# Altium footprint library Master.PcbLib: 178 footprints (part 10 of 12)
Each footprint in its own frame and in the unit in brackets; x right, y up, seen from the top. Pads: shape width x height; smd on the part's side, far side on the other; paste and mask are expansions set on the pad; w line width, h text height; cw(c..) or ccw(c..) is an arc to the next point about the centre after c.
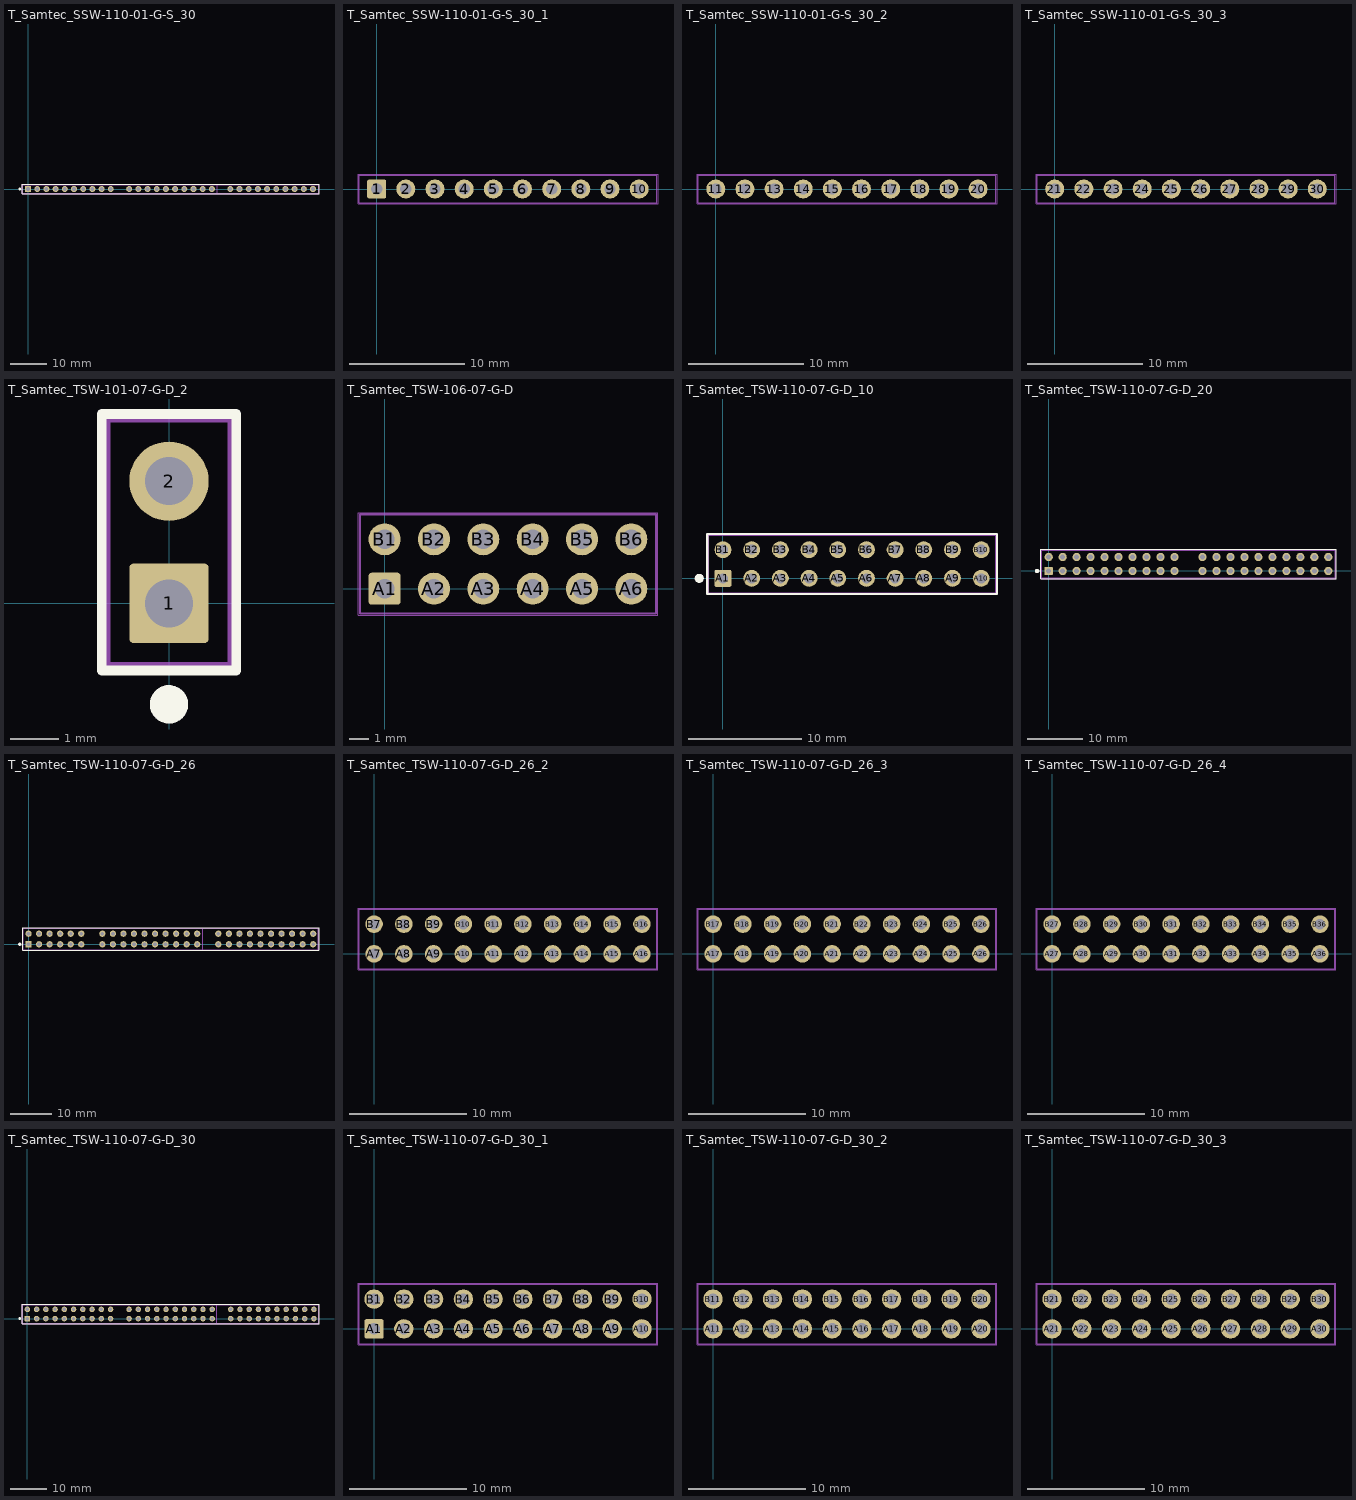
[diagram p9: the footprints below, top view; thin cyan lines are the x and y axes]

## T_Samtec_SSW-110-01-G-S_30 [mm]
pads (30):
  rrect20% 1.65x1.65 hole 1: 1(0,0)
  round 1.65 hole 1: 2(2.54,0) 3(5.08,0) 4(7.62,0) 5(10.16,0) 6(12.7,0) 7(15.24,0) 8(17.78,0) 9(20.32,0) 10(22.86,0) 11(27.94,0) 12(30.48,0) 13(33.02,0) 14(35.56,0) 15(38.1,0) 16(40.64,0) 17(43.18,0) 18(45.72,0) 19(48.26,0) 20(50.8,0) 21(55.88,0) 22(58.42,0) 23(60.96,0) 24(63.5,0) 25(66.04,0) 26(68.58,0) 27(71.12,0) 28(73.66,0) 29(76.2,0) 30(78.74,0)
Top Overlay:
  circle w0.4: c-2.3,0 r0.2
  lines w0.2: -1.65,-1.33 80.391,-1.33 80.391,1.33 -1.65,1.33 -1.65,-1.33
Top Component Outline:
  lines w0.05: -1.625,-1.305 -1.625,1.305 80.366,1.305 80.366,-1.305 -1.625,-1.305
Top 3D Body:
  lines w0.001: 80.265,-1.205 80.265,1.205 ; -1.525,-1.205 -1.525,1.205 52.325,1.205 52.325,-1.205 -1.525,-1.205
Top Component Center:
  circle w0.05: c0,0 r0.35
  lines w0.05: -0.5,0 0.5,0 ; 0,-0.5 0,0.5
Top Dimensions:
  lines w0.1: -1.525,-1.2 80.264,-1.2 80.264,1.2 -1.525,1.2 -1.525,-1.2
Top Assembly:
  text ".Designator" at 38.938,1.778 h0.75
3D body "Samtec-SSW-110-01-G-P.step": height 8.52, standoff -2.63, extent -1.524,-1.206 24.384,1.207
3D body "Samtec-SSW-110-01-G-P.step": height 8.52, standoff -2.63, extent 26.416,-1.206 52.324,1.207
3D body "Samtec-SSW-110-01-G-P.step": height 8.52, standoff -2.63, extent 54.356,-1.206 80.264,1.207

## T_Samtec_SSW-110-01-G-S_30_1 [mm]
pads (10):
  rrect20% 1.65x1.65 hole 1: 1(0,0)
  round 1.65 hole 1: 2(2.54,0) 3(5.08,0) 4(7.62,0) 5(10.16,0) 6(12.7,0) 7(15.24,0) 8(17.78,0) 9(20.32,0) 10(22.86,0)
Top Component Outline:
  lines w0.05: -1.625,-1.305 24.5,-1.305 24.5,1.305 -1.625,1.305 -1.625,-1.305
Top 3D Body:
  lines w0.001: -1.525,-1.205 24.384,-1.205 24.384,1.205 -1.525,1.205 -1.525,-1.205
Top Component Center:
  circle w0.05: c0,0 r0.35
  lines w0.05: -0.5,0 0.5,0 ; 0,-0.5 0,0.5
Top Dimensions:
  lines w0.1: -1.525,-1.2 -1.525,1.2 24.384,1.2 24.384,-1.2 -1.525,-1.2
Top Assembly:
  text ".Designator" at 9.7,1.7 h0.75
3D body "Samtec-SSW-110-01-G-P.step": height 8.52, standoff -2.63, extent -1.524,-1.206 24.384,1.207

## T_Samtec_SSW-110-01-G-S_30_2 [mm]
pads (10):
  round 1.65 hole 1: 11(0,0) 12(2.54,0) 13(5.08,0) 14(7.62,0) 15(10.16,0) 16(12.7,0) 17(15.24,0) 18(17.78,0) 19(20.32,0) 20(22.86,0)
Top Component Outline:
  lines w0.05: -1.64,-1.305 -1.64,1.305 24.51,1.305 24.51,-1.305 -1.64,-1.305
Top 3D Body:
  lines w0.001: -1.524,-1.205 -1.524,1.205 24.385,1.205 24.385,-1.205 -1.524,-1.205
Top Component Center:
  circle w0.05: c0,0 r0.35
  lines w0.05: -0.5,0 0.5,0 ; 0,-0.5 0,0.5
Top Dimensions:
  lines w0.1: -1.524,-1.2 24.384,-1.2 24.384,1.2 -1.524,1.2 -1.524,-1.2
Top Assembly:
  text ".Designator" at 9.728,1.778 h0.75
3D body "Samtec-SSW-110-01-G-P.step": height 8.52, standoff -2.63, extent -1.524,-1.206 24.384,1.207

## T_Samtec_SSW-110-01-G-S_30_3 [mm]
pads (10):
  round 1.65 hole 1: 21(0,0) 22(2.54,0) 23(5.08,0) 24(7.62,0) 25(10.16,0) 26(12.7,0) 27(15.24,0) 28(17.78,0) 29(20.32,0) 30(22.86,0)
Top Component Outline:
  lines w0.05: -1.626,-1.305 -1.626,1.305 24.486,1.305 24.486,-1.305 -1.626,-1.305
Top 3D Body:
  lines w0.001: 24.385,-1.205 24.385,1.205 ; 24.385,-1.205 -1.524,-1.205 -1.524,1.205 24.385,1.205 ; 24.385,-1.205 24.385,1.205
Top Component Center:
  circle w0.05: c0,0 r0.35
  lines w0.05: -0.5,0 0.5,0 ; 0,-0.5 0,0.5
Top Dimensions:
  lines w0.1: -1.524,-1.2 24.384,-1.2 24.384,1.2 -1.524,1.2 -1.524,-1.2
Top Assembly:
  text ".Designator" at 9.62,1.5 h0.75
3D body "Samtec-SSW-110-01-G-P.step": height 8.52, standoff -2.63, extent -1.524,-1.206 24.384,1.207

## T_Samtec_TSW-101-07-G-D_2 [mm]
pads (2):
  rrect10% 1.65x1.65 hole 1: 1(0,0)
  round 1.65 hole 1: 2(0,2.54)
Top Overlay:
  circle w0.4: c0,-2.1 r0.2
  lines w0.2: -1.395,-1.395 -1.395,3.935 1.395,3.935 1.395,-1.395 -1.395,-1.395
Top Component Outline:
  lines w0.05: -1.37,-1.37 1.37,-1.37 1.37,3.91 -1.37,3.91 -1.37,-1.37
Top 3D Body:
  lines w0.001: -1.27,-1.27 -1.27,3.81 1.27,3.81 1.27,-1.27 -1.27,-1.27
Top Component Center:
  circle w0.05: c0,0 r0.35
  lines w0.05: -0.5,0 0.5,0 ; 0,-0.5 0,0.5
Top Dimensions:
  lines w0.1: -1.27,-1.27 1.27,-1.27 1.27,3.81 -1.27,3.81 -1.27,-1.27
Top Assembly:
  text ".Designator" at 2.1,-0.3 h0.75
3D body "Samtec-TSW-101-07-G-D.step": height 8.4, standoff -2.52, extent -1.27,-1.27 1.27,3.81

## T_Samtec_TSW-106-07-G-D [mm]
pads (12):
  rrect20% 1.65x1.65 hole 1: A1(0,0)
  round 1.65 hole 1: A2(2.54,0) A3(5.08,0) A4(7.62,0) A5(10.16,0) A6(12.7,0) B1(0,2.54) B2(2.54,2.54) B3(5.08,2.54) B4(7.62,2.54) B5(10.16,2.54) B6(12.7,2.54)
Top Component Outline:
  lines w0.05: -1.37,-1.37 -1.37,3.91 14.072,3.91 14.072,-1.37 -1.37,-1.37
Top 3D Body:
  lines w0.001: -1.27,-1.27 -1.27,3.81 13.97,3.81 13.97,-1.27 -1.27,-1.27
Top Component Center:
  circle w0.05: c0,0 r0.35
  lines w0.05: -0.5,0 0.5,0 ; 0,-0.5 0,0.5
Top Dimensions:
  lines w0.1: -1.27,-1.27 13.97,-1.27 13.97,3.81 -1.27,3.81 -1.27,-1.27
Top Assembly:
  text ".Designator" at 4.445,4.445 h0.75
3D body "TSW-106-07-G-D.stp": height 8.39, standoff -2.53, extent -1.27,-1.27 13.97,3.81

## T_Samtec_TSW-110-07-G-D_10 [mm]
pads (20):
  rrect20% 1.5x1.5 hole 0.9: A1(0,0)
  round 1.5 hole 0.9: A2(2.54,0) A3(5.08,0) A4(7.62,0) A5(10.16,0) A6(12.7,0) A7(15.24,0) A8(17.78,0) A9(20.32,0) A10(22.86,0) B1(0,2.54) B2(2.54,2.54) B3(5.08,2.54) B4(7.62,2.54) B5(10.16,2.54) B6(12.7,2.54) B7(15.24,2.54) B8(17.78,2.54) B9(20.32,2.54) B10(22.86,2.54)
Top Overlay:
  circle w0.4: c-2.1,0 r0.2
  lines w0.2: -1.395,-1.395 -1.395,3.935 24.257,3.935 24.257,-1.395 -1.395,-1.395
Top Component Outline:
  lines w0.05: -1.37,-1.37 -1.37,3.91 24.257,3.91 24.257,-1.37 -1.37,-1.37
Top 3D Body:
  lines w0.001: -1.27,-1.27 -1.27,3.81 24.13,3.81 24.13,-1.27 -1.27,-1.27
Top Component Center:
  circle w0.05: c0,0 r0.35
  lines w0.05: -0.5,0 0.5,0 ; 0,-0.5 0,0.5
Top Dimensions:
  lines w0.1: -1.27,-1.27 24.13,-1.27 24.13,3.81 -1.27,3.81 -1.27,-1.27
Top Assembly:
  text ".Designator" at 9.225,4.225 h0.75
3D body "Samtec-TSW-110-07-G-D.step": height 8.4, standoff -2.52, extent -1.27,-1.27 24.13,3.81

## T_Samtec_TSW-110-07-G-D_20 [mm]
pads (40):
  rrect20% 1.5x1.5 hole 0.9: A1(0,0)
  round 1.5 hole 0.9: A2(2.54,0) A3(5.08,0) A4(7.62,0) A5(10.16,0) A6(12.7,0) A7(15.24,0) A8(17.78,0) A9(20.32,0) A10(22.86,0) A11(27.94,0) A12(30.48,0) A13(33.02,0) A14(35.56,0) A15(38.1,0) A16(40.64,0) A17(43.18,0) A18(45.72,0) A19(48.26,0) A20(50.8,0) B1(0,2.54) B2(2.54,2.54) B3(5.08,2.54) B4(7.62,2.54) B5(10.16,2.54) B6(12.7,2.54) B7(15.24,2.54) B8(17.78,2.54) B9(20.32,2.54) B10(22.86,2.54) B11(27.94,2.54) B12(30.48,2.54) B13(33.02,2.54) B14(35.56,2.54) B15(38.1,2.54) B16(40.64,2.54) B17(43.18,2.54) B18(45.72,2.54) B19(48.26,2.54) B20(50.8,2.54)
Top Overlay:
  circle w0.4: c-2.1,0 r0.2
  lines w0.2: -1.395,-1.395 -1.395,3.935 52.195,3.935 52.195,-1.395 -1.395,-1.395
Top Component Outline:
  lines w0.05: -1.37,-1.37 -1.37,3.91 52.17,3.91 52.17,-1.37 -1.37,-1.37
Top 3D Body:
  lines w0.001: 52.07,-1.27 -1.27,-1.27 -1.27,3.81 52.07,3.81 ; 52.07,-1.27 52.07,3.81 ; 52.07,-1.27 52.07,3.81
Top Component Center:
  circle w0.05: c0,0 r0.35
  lines w0.05: -0.5,0 0.5,0 ; 0,-0.5 0,0.5
Top Dimensions:
  lines w0.1: -1.27,-1.27 52.07,-1.27 52.07,3.81 -1.27,3.81 -1.27,-1.27
Top Assembly:
  text ".Designator" at 23.625,4.425 h0.75
3D body "Samtec-TSW-110-07-G-D.step": height 8.4, standoff -2.52, extent 26.67,-1.27 52.07,3.81
3D body "Samtec-TSW-110-07-G-D.step": height 8.4, standoff -2.52, extent -1.27,-1.27 24.13,3.81

## T_Samtec_TSW-110-07-G-D_26 [mm]
pads (52):
  rrect20% 1.5x1.5 hole 0.9: A1(0,0)
  round 1.5 hole 0.9: A2(2.54,0) A3(5.08,0) A4(7.62,0) A5(10.16,0) A6(12.7,0) A7(17.78,0) A8(20.32,0) A9(22.86,0) A10(25.4,0) A11(27.94,0) A12(30.48,0) A13(33.02,0) A14(35.56,0) A15(38.1,0) A16(40.64,0) A17(45.72,0) A18(48.26,0) A19(50.8,0) A20(53.34,0) A21(55.88,0) A22(58.42,0) A23(60.96,0) A24(63.5,0) A25(66.04,0) A26(68.58,0) B1(0,2.54) B2(2.54,2.54) B3(5.08,2.54) B4(7.62,2.54) B5(10.16,2.54) B6(12.7,2.54) B7(17.78,2.54) B8(20.32,2.54) B9(22.86,2.54) B10(25.4,2.54) B11(27.94,2.54) B12(30.48,2.54) B13(33.02,2.54) B14(35.56,2.54) B15(38.1,2.54) B16(40.64,2.54) B17(45.72,2.54) B18(48.26,2.54) B19(50.8,2.54) B20(53.34,2.54) B21(55.88,2.54) B22(58.42,2.54) B23(60.96,2.54) B24(63.5,2.54) B25(66.04,2.54) B26(68.58,2.54)
Top Overlay:
  circle w0.4: c-2.1,0 r0.2
  lines w0.2: 69.952,-1.395 -1.395,-1.395 -1.395,3.935 69.977,3.935 69.977,-1.395
Top Component Outline:
  lines w0.05: -1.37,-1.37 69.952,-1.37 69.952,3.91 -1.37,3.91 -1.37,-1.37
Top 3D Body:
  lines w0.001: 52.07,-1.27 -1.27,-1.27 -1.27,3.81 52.07,3.81 ; 41.91,-1.27 41.91,3.81 41.91,-1.27
Top Component Center:
  circle w0.05: c0,0 r0.35
  lines w0.05: -0.5,0 0.5,0 ; 0,-0.5 0,0.5
Top Dimensions:
  lines w0.1: -1.27,-1.27 -1.27,3.81 69.85,3.81 69.85,-1.27 -1.27,-1.27
Top Assembly:
  text ".Designator" at 33.02,4.445 h0.75
3D body "TSW-106-07-G-D.stp": height 8.39, standoff -2.53, extent -1.27,-1.27 13.97,3.81
3D body "Samtec-TSW-110-07-G-D.step": height 8.4, standoff -2.52, extent 44.45,-1.27 69.85,3.81
3D body "Samtec-TSW-110-07-G-D.step": height 8.4, standoff -2.52, extent 16.51,-1.27 41.91,3.81

## T_Samtec_TSW-110-07-G-D_26_2 [mm]
pads (20):
  round 1.5 hole 0.9: A7(0,0) A8(2.54,0) A9(5.08,0) A10(7.62,0) A11(10.16,0) A12(12.7,0) A13(15.24,0) A14(17.78,0) A15(20.32,0) A16(22.86,0) B7(0,2.54) B8(2.54,2.54) B9(5.08,2.54) B10(7.62,2.54) B11(10.16,2.54) B12(12.7,2.54) B13(15.24,2.54) B14(17.78,2.54) B15(20.32,2.54) B16(22.86,2.54)
Top Component Outline:
  lines w0.05: -1.372,-1.37 24.232,-1.37 24.232,3.91 -1.372,3.91 -1.372,-1.37
Top 3D Body:
  lines w0.001: 24.13,-1.27 24.13,3.81 ; 24.13,-1.27 24.13,3.81 ; 24.13,-1.27 -1.27,-1.27 -1.27,3.81 24.13,3.81
Top Component Center:
  circle w0.05: c0,0 r0.35
  lines w0.05: -0.5,0 0.5,0 ; 0,-0.5 0,0.5
Top Dimensions:
  lines w0.1: -1.27,-1.27 -1.27,3.81 24.13,3.81 24.13,-1.27 -1.27,-1.27
Top Assembly:
  text ".Designator" at 10.795,4.445 h0.75
3D body "Samtec-TSW-110-07-G-D.step": height 8.4, standoff -2.52, extent -1.27,-1.27 24.13,3.81

## T_Samtec_TSW-110-07-G-D_26_3 [mm]
pads (20):
  round 1.5 hole 0.9: A17(0,0) A18(2.54,0) A19(5.08,0) A20(7.62,0) A21(10.16,0) A22(12.7,0) A23(15.24,0) A24(17.78,0) A25(20.32,0) A26(22.86,0) B17(0,2.54) B18(2.54,2.54) B19(5.08,2.54) B20(7.62,2.54) B21(10.16,2.54) B22(12.7,2.54) B23(15.24,2.54) B24(17.78,2.54) B25(20.32,2.54) B26(22.86,2.54)
Top Component Outline:
  lines w0.05: -1.37,-1.37 24.232,-1.37 24.232,3.91 -1.37,3.91 -1.37,-1.37
Top 3D Body:
  lines w0.001: -1.27,-1.27 24.13,-1.27 24.13,3.81 -1.27,3.81 -1.27,-1.27
Top Component Center:
  circle w0.05: c0,0 r0.35
  lines w0.05: -0.5,0 0.5,0 ; 0,-0.5 0,0.5
Top Dimensions:
  lines w0.1: -1.27,-1.27 -1.27,3.81 24.13,3.81 24.13,-1.27 -1.27,-1.27
Top Assembly:
  text ".Designator" at 10.16,4.445 h0.75
3D body "Samtec-TSW-110-07-G-D.step": height 8.4, standoff -2.52, extent -1.27,-1.27 24.13,3.81

## T_Samtec_TSW-110-07-G-D_26_4 [mm]
pads (20):
  round 1.5 hole 0.9: A27(0,0) A28(2.54,0) A29(5.08,0) A30(7.62,0) A31(10.16,0) A32(12.7,0) A33(15.24,0) A34(17.78,0) A35(20.32,0) A36(22.86,0) B27(0,2.54) B28(2.54,2.54) B29(5.08,2.54) B30(7.62,2.54) B31(10.16,2.54) B32(12.7,2.54) B33(15.24,2.54) B34(17.78,2.54) B35(20.32,2.54) B36(22.86,2.54)
Top Component Outline:
  lines w0.05: -1.37,-1.37 -1.37,3.91 24.232,3.91 24.232,-1.37 -1.37,-1.37
Top 3D Body:
  lines w0.001: -1.27,-1.27 -1.27,3.81 24.13,3.81 24.13,-1.27 -1.27,-1.27
Top Component Center:
  circle w0.05: c0,0 r0.35
  lines w0.05: -0.5,0 0.5,0 ; 0,-0.5 0,0.5
Top Dimensions:
  lines w0.1: -1.27,-1.27 24.13,-1.27 24.13,3.81 -1.27,3.81 -1.27,-1.27
Top Assembly:
  text ".Designator" at 10.16,4.445 h0.75
3D body "Samtec-TSW-110-07-G-D.step": height 8.4, standoff -2.52, extent -1.27,-1.27 24.13,3.81

## T_Samtec_TSW-110-07-G-D_30 [mm]
pads (60):
  rrect20% 1.5x1.5 hole 0.9: A1(0,0)
  round 1.5 hole 0.9: A2(2.54,0) A3(5.08,0) A4(7.62,0) A5(10.16,0) A6(12.7,0) A7(15.24,0) A8(17.78,0) A9(20.32,0) A10(22.86,0) A11(27.94,0) A12(30.48,0) A13(33.02,0) A14(35.56,0) A15(38.1,0) A16(40.64,0) A17(43.18,0) A18(45.72,0) A19(48.26,0) A20(50.8,0) A21(55.88,0) A22(58.42,0) A23(60.96,0) A24(63.5,0) A25(66.04,0) A26(68.58,0) A27(71.12,0) A28(73.66,0) A29(76.2,0) A30(78.74,0) B1(0,2.54) B2(2.54,2.54) B3(5.08,2.54) B4(7.62,2.54) B5(10.16,2.54) B6(12.7,2.54) B7(15.24,2.54) B8(17.78,2.54) B9(20.32,2.54) B10(22.86,2.54) B11(27.94,2.54) B12(30.48,2.54) B13(33.02,2.54) B14(35.56,2.54) B15(38.1,2.54) B16(40.64,2.54) B17(43.18,2.54) B18(45.72,2.54) B19(48.26,2.54) B20(50.8,2.54) B21(55.88,2.54) B22(58.42,2.54) B23(60.96,2.54) B24(63.5,2.54) B25(66.04,2.54) B26(68.58,2.54) B27(71.12,2.54) B28(73.66,2.54) B29(76.2,2.54) B30(78.74,2.54)
Top Overlay:
  circle w0.4: c-2.1,0 r0.2
  lines w0.2: -1.395,-1.395 -1.395,3.935 80.137,3.935 80.137,-1.395 -1.395,-1.395
Top Component Outline:
  lines w0.05: -1.37,-1.37 -1.37,3.91 80.112,3.91 80.112,-1.37 -1.37,-1.37
Top 3D Body:
  lines w0.001: 52.07,-1.27 -1.27,-1.27 -1.27,3.81 52.07,3.81 ; 52.07,-1.27 52.07,3.81 ; 52.07,-1.27 52.07,3.81
Top Component Center:
  circle w0.05: c0,0 r0.35
  lines w0.05: -0.5,0 0.5,0 ; 0,-0.5 0,0.5
Top Dimensions:
  lines w0.1: -1.27,-1.27 80.01,-1.27 80.01,3.81 -1.27,3.81 -1.27,-1.27
Top Assembly:
  text ".Designator" at 23.625,4.425 h0.75
3D body "Samtec-TSW-110-07-G-D.step": height 8.4, standoff -2.52, extent 26.67,-1.27 52.07,3.81
3D body "Samtec-TSW-110-07-G-D.step": height 8.4, standoff -2.52, extent -1.27,-1.27 24.13,3.81
3D body "Samtec-TSW-110-07-G-D.step": height 8.4, standoff -2.52, extent 54.61,-1.27 80.01,3.81

## T_Samtec_TSW-110-07-G-D_30_1 [mm]
pads (20):
  rrect20% 1.65x1.65 hole 1: A1(0,0)
  round 1.65 hole 1: A2(2.54,0) A3(5.08,0) A4(7.62,0) A5(10.16,0) A6(12.7,0) A7(15.24,0) A8(17.78,0) A9(20.32,0) A10(22.86,0) B1(0,2.54) B2(2.54,2.54) B3(5.08,2.54) B4(7.62,2.54) B5(10.16,2.54) B6(12.7,2.54) B7(15.24,2.54) B8(17.78,2.54) B9(20.32,2.54) B10(22.86,2.54)
Top Component Outline:
  lines w0.05: -1.372,-1.37 24.232,-1.37 24.232,3.91 -1.372,3.91 -1.372,-1.37
Top 3D Body:
  lines w0.001: -1.27,-1.27 24.13,-1.27 24.13,3.81 -1.27,3.81 -1.27,-1.27
Top Component Center:
  circle w0.05: c0,0 r0.35
  lines w0.05: -0.5,0 0.5,0 ; 0,-0.5 0,0.5
Top Dimensions:
  lines w0.1: -1.27,-1.27 -1.27,3.81 24.13,3.81 24.13,-1.27 -1.27,-1.27
Top Assembly:
  text ".Designator" at 9.525,4.445 h0.75
3D body "Samtec-TSW-110-07-G-D.step": height 8.4, standoff -2.52, extent -1.27,-1.27 24.13,3.81

## T_Samtec_TSW-110-07-G-D_30_2 [mm]
pads (20):
  round 1.65 hole 1: A11(0,0) A12(2.54,0) A13(5.08,0) A14(7.62,0) A15(10.16,0) A16(12.7,0) A17(15.24,0) A18(17.78,0) A19(20.32,0) A20(22.86,0) B11(0,2.54) B12(2.54,2.54) B13(5.08,2.54) B14(7.62,2.54) B15(10.16,2.54) B16(12.7,2.54) B17(15.24,2.54) B18(17.78,2.54) B19(20.32,2.54) B20(22.86,2.54)
Top Component Outline:
  lines w0.05: -1.372,-1.37 -1.372,3.91 24.232,3.91 24.232,-1.37 -1.372,-1.37
Top 3D Body:
  lines w0.001: 24.13,-1.27 -1.27,-1.27 -1.27,3.81 24.13,3.81 ; 24.13,-1.27 24.13,3.81 ; 24.13,-1.27 24.13,3.81
Top Component Center:
  circle w0.05: c0,0 r0.35
  lines w0.05: -0.5,0 0.5,0 ; 0,-0.5 0,0.5
Top Dimensions:
  lines w0.1: -1.27,-1.27 24.13,-1.27 24.13,3.81 -1.27,3.81 -1.27,-1.27
Top Assembly:
  text ".Designator" at 9.525,4.445 h0.75
3D body "Samtec-TSW-110-07-G-D.step": height 8.4, standoff -2.52, extent -1.27,-1.27 24.13,3.81

## T_Samtec_TSW-110-07-G-D_30_3 [mm]
pads (20):
  round 1.65 hole 1: A21(0,0) A22(2.54,0) A23(5.08,0) A24(7.62,0) A25(10.16,0) A26(12.7,0) A27(15.24,0) A28(17.78,0) A29(20.32,0) A30(22.86,0) B21(0,2.54) B22(2.54,2.54) B23(5.08,2.54) B24(7.62,2.54) B25(10.16,2.54) B26(12.7,2.54) B27(15.24,2.54) B28(17.78,2.54) B29(20.32,2.54) B30(22.86,2.54)
Top Component Outline:
  lines w0.05: -1.372,-1.37 24.232,-1.37 24.232,3.91 -1.372,3.91 -1.372,-1.37
Top 3D Body:
  lines w0.001: 24.13,-1.27 -1.27,-1.27 -1.27,3.81 24.13,3.81 ; 24.13,-1.27 24.13,3.81 ; 24.13,-1.27 24.13,3.81
Top Component Center:
  circle w0.05: c0,0 r0.35
  lines w0.05: -0.5,0 0.5,0 ; 0,-0.5 0,0.5
Top Dimensions:
  lines w0.1: -1.27,-1.27 -1.27,3.81 24.13,3.81 24.13,-1.27 -1.27,-1.27
Top Assembly:
  text ".Designator" at 9.525,4.445 h0.75
3D body "Samtec-TSW-110-07-G-D.step": height 8.4, standoff -2.52, extent -1.27,-1.27 24.13,3.81